# Altium footprint library Conectores.PcbLib: 55 footprints (part 4 of 4)
Each footprint in its own frame and in the unit in brackets; x right, y up, seen from the top. Pads: shape width x height; smd on the part's side, far side on the other; paste and mask are expansions set on the pad; w line width, h text height; cw(c..) or ccw(c..) is an arc to the next point about the centre after c.
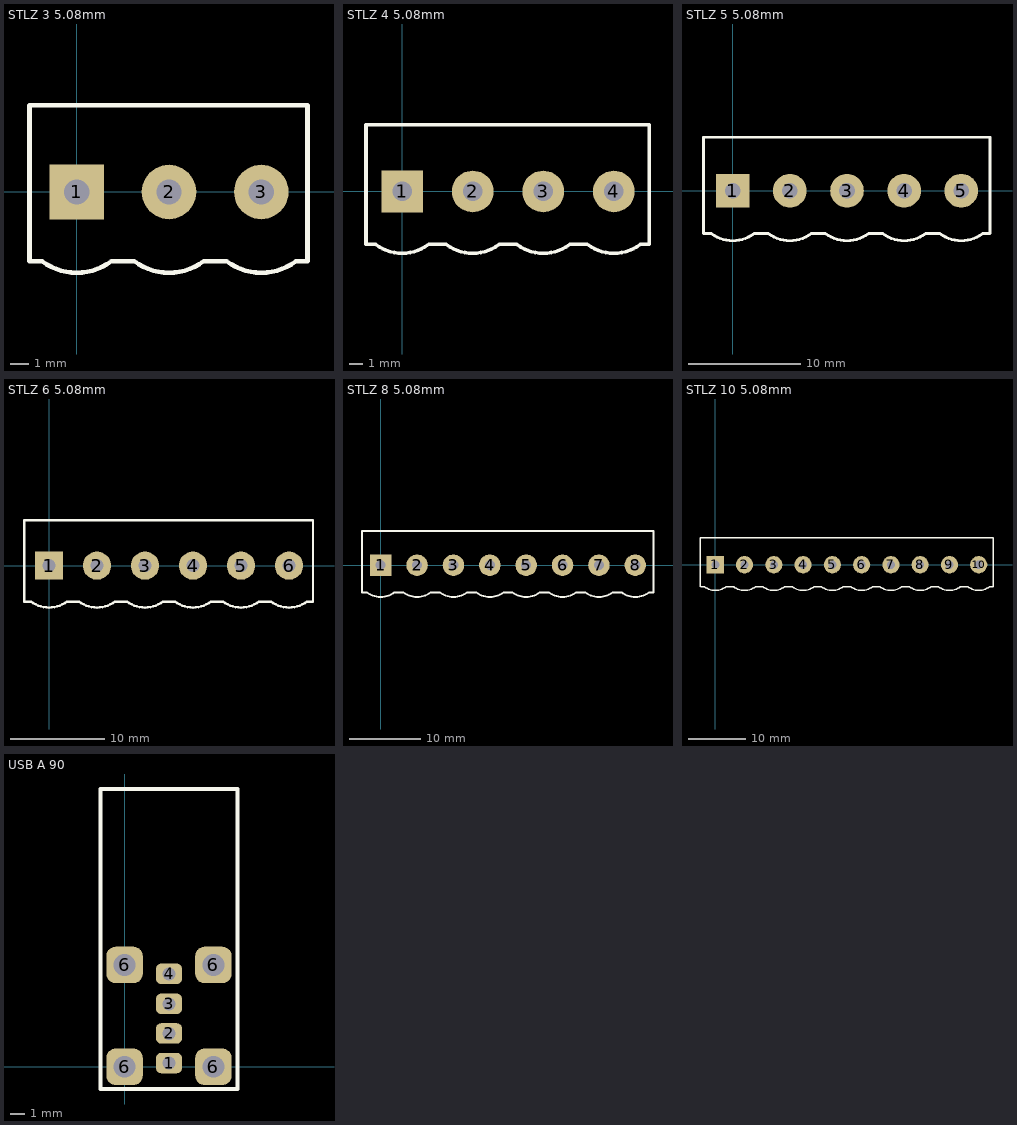
[diagram p3: the footprints below, top view; thin cyan lines are the x and y axes]

## STLZ 3 5.08mm [mm] "Socket STLZ 3 Pos. 5.08mm Pitch"
pads (3):
  rect 3x3 hole 1.4: 1(0,0)
  round 3 hole 1.4: 2(5.08,0) 3(10.16,0)
Top Overlay:
  lines w0.254: -2.6,-3.81 -2.6,4.775 12.7,4.775 12.7,-3.81 12.065,-3.81 cw(c10.16,-1.27) 8.255,-3.81 6.985,-3.81 cw(c5.08,-1.27) 3.175,-3.81 1.905,-3.81 cw(c0,-1.27) -1.905,-3.81 -2.54,-3.81 ; 5.08,0 5.1,0
3D body "STLZ 3 vias.STEP": height 12.5, standoff -3.5, extent -2.52,-3.825 12.72,4.675

## STLZ 4 5.08mm [mm] "Socket STLZ 4 Pos. 5.08mm Pitch"
pads (4):
  rect 3x3 hole 1.4: 1(0,0)
  round 3 hole 1.4: 2(5.08,0) 3(10.16,0) 4(15.24,0)
Top Overlay:
  lines w0.254: -2.6,-3.81 -2.6,4.8 17.78,4.8 17.78,-3.81 17.145,-3.81 cw(c15.24,-1.27) 13.335,-3.81 12.065,-3.81 cw(c10.16,-1.27) 8.255,-3.81 7.62,-3.81 6.985,-3.81 cw(c5.08,-1.27) 3.175,-3.81 1.905,-3.81 cw(c0,-1.27) -1.905,-3.81 -2.54,-3.81 ; 5.08,0 5.1,0
3D body "STLZ 2 vias.STEP": height 12.5, standoff -3.5, extent 7.569,-3.801 17.729,4.699
3D body "STLZ 2 vias.STEP": height 12.5, standoff -3.5, extent -2.58,-3.8 7.58,4.7

## STLZ 5 5.08mm [mm] "Socket STLZ 5 Pos. 5.08mm Pitch"
pads (5):
  rect 3x3 hole 1.4: 1(0,0)
  round 3 hole 1.4: 2(5.08,0) 3(10.16,0) 4(15.24,0) 5(20.32,0)
Top Overlay:
  lines w0.254: -2.6,-3.81 -2.6,4.75 22.86,4.75 22.86,-3.81 22.225,-3.81 cw(c20.32,-1.27) 18.415,-3.81 17.145,-3.81 cw(c15.24,-1.27) 13.335,-3.81 12.065,-3.81 cw(c10.16,-1.27) 8.255,-3.81 6.985,-3.81 cw(c5.08,-1.27) 3.175,-3.81 1.905,-3.81 cw(c0,-1.27) -1.905,-3.81 -2.54,-3.81 ; 5.08,0 5.1,0
3D body "STLZ 3 vias.STEP": height 12.5, standoff -3.5, extent -2.52,-3.825 12.72,4.675
3D body "STLZ 2 vias.STEP": height 12.5, standoff -3.5, extent 12.65,-3.825 22.81,4.675

## STLZ 6 5.08mm [mm] "Socket STLZ 6 Pos. 5.08mm Pitch"
pads (6):
  rect 3x3 hole 1.4: 1(0,0)
  round 3 hole 1.4: 2(5.08,0) 3(10.16,0) 4(15.24,0) 5(20.32,0) 6(25.4,0)
Top Overlay:
  lines w0.254: -2.6,-3.81 -2.6,4.775 27.94,4.775 27.94,-3.81 27.305,-3.81 cw(c25.4,-1.27) 23.495,-3.81 22.225,-3.81 cw(c20.32,-1.27) 18.415,-3.81 17.145,-3.81 cw(c15.24,-1.27) 13.335,-3.81 12.065,-3.81 cw(c10.16,-1.27) 8.255,-3.81 6.985,-3.81 cw(c5.08,-1.27) 3.175,-3.81 1.905,-3.81 cw(c0,-1.27) -1.905,-3.81 -2.54,-3.81 ; 5.08,0 5.1,0
3D body "STLZ 3 vias.STEP": height 12.5, standoff -3.5, extent -2.52,-3.825 12.72,4.675
3D body "STLZ 3 vias.STEP": height 12.5, standoff -3.5, extent 12.72,-3.825 27.96,4.675

## STLZ 8 5.08mm [mm] "Socket STLZ 8 Pos. 5.08mm Pitch"
pads (8):
  rect 3x3 hole 1.4: 1(0,0)
  round 3 hole 1.4: 2(5.08,0) 3(10.16,0) 4(15.24,0) 5(20.32,0) 6(25.4,0) 7(30.48,0) 8(35.56,0)
Top Overlay:
  lines w0.254: -2.6,-3.81 -2.6,4.775 38.1,4.775 38.1,-3.81 37.465,-3.81 cw(c35.56,-1.27) 33.655,-3.81 32.385,-3.81 cw(c30.48,-1.27) 28.575,-3.81 27.305,-3.81 cw(c25.4,-1.27) 23.495,-3.81 22.225,-3.81 cw(c20.32,-1.27) 18.415,-3.81 17.145,-3.81 cw(c15.24,-1.27) 13.335,-3.81 12.065,-3.81 cw(c10.16,-1.27) 8.255,-3.81 6.985,-3.81 cw(c5.08,-1.27) 3.175,-3.81 1.905,-3.81 cw(c0,-1.27) -1.905,-3.81 -2.54,-3.81 ; 5.08,0 5.1,0
3D body "STLZ 2 vias.STEP": height 12.5, standoff -3.5, extent 27.9,-3.825 38.06,4.675
3D body "STLZ 3 vias.STEP": height 12.5, standoff -3.5, extent -2.52,-3.825 12.72,4.675
3D body "STLZ 3 vias.STEP": height 12.5, standoff -3.5, extent 12.72,-3.825 27.96,4.675

## STLZ 10 5.08mm [mm] "Socket STLZ 10 Pos. 5.08mm Pitch"
pads (10):
  rect 3x3 hole 1.4: 1(0,0)
  round 3 hole 1.4: 2(5.08,0) 3(10.16,0) 4(15.24,0) 5(20.32,0) 6(25.4,0) 7(30.48,0) 8(35.56,0) 9(40.64,0) 10(45.72,0)
Top Overlay:
  lines w0.254: -2.6,-3.81 -2.6,4.7 48.26,4.7 48.26,-3.81 47.625,-3.81 cw(c45.72,-1.27) 43.815,-3.81 42.545,-3.81 cw(c40.64,-1.27) 38.735,-3.81 37.465,-3.81 cw(c35.56,-1.27) 33.655,-3.81 32.385,-3.81 cw(c30.48,-1.27) 28.575,-3.81 27.305,-3.81 cw(c25.4,-1.27) 23.495,-3.81 22.225,-3.81 cw(c20.32,-1.27) 18.415,-3.81 17.145,-3.81 cw(c15.24,-1.27) 13.335,-3.81 12.065,-3.81 cw(c10.16,-1.27) 8.255,-3.81 6.985,-3.81 cw(c5.08,-1.27) 3.175,-3.81 1.905,-3.81 cw(c0,-1.27) -1.905,-3.81 -2.54,-3.81 ; 5.08,0 5.1,0
3D body "STLZ 3 vias.STEP": height 12.5, standoff -3.5, extent 22.8,-3.825 38.04,4.675
3D body "STLZ 2 vias.STEP": height 12.5, standoff -3.5, extent 38.025,-3.825 48.185,4.675
3D body "STLZ 2 vias.STEP": height 12.5, standoff -3.5, extent 12.675,-3.825 22.835,4.675
3D body "STLZ 3 vias.STEP": height 12.5, standoff -3.5, extent -2.52,-3.825 12.72,4.675

## USB A 90 [mm]
pads (8):
  rrect50% 1.8x1.4 hole 0.9 unplated: 1(3.048,0.254) 2(3.048,2.286) 3(3.048,4.318) 4(3.048,6.375)
  rrect50% 2.5x2.5 hole 1.5 unplated: 6(0,0) 6(0,6.985) 6(6.096,0) 6(6.096,6.985)
Top Overlay:
  lines w0.254: -1.651,-1.524 7.747,-1.524 7.747,19.05 -0.889,19.05 -1.651,19.05 -1.651,-1.524
3D body "usb_2_a_90_v.stp": height 15.75, standoff -2.45, extent -0.462,-0.583 6.538,18.667